# Altium footprint library Connector.PcbLib: 272 footprints (part 5 of 17)
Each footprint in its own frame and in the unit in brackets; x right, y up, seen from the top. Pads: shape width x height; smd on the part's side, far side on the other; paste and mask are expansions set on the pad; w line width, h text height; cw(c..) or ccw(c..) is an arc to the next point about the centre after c.
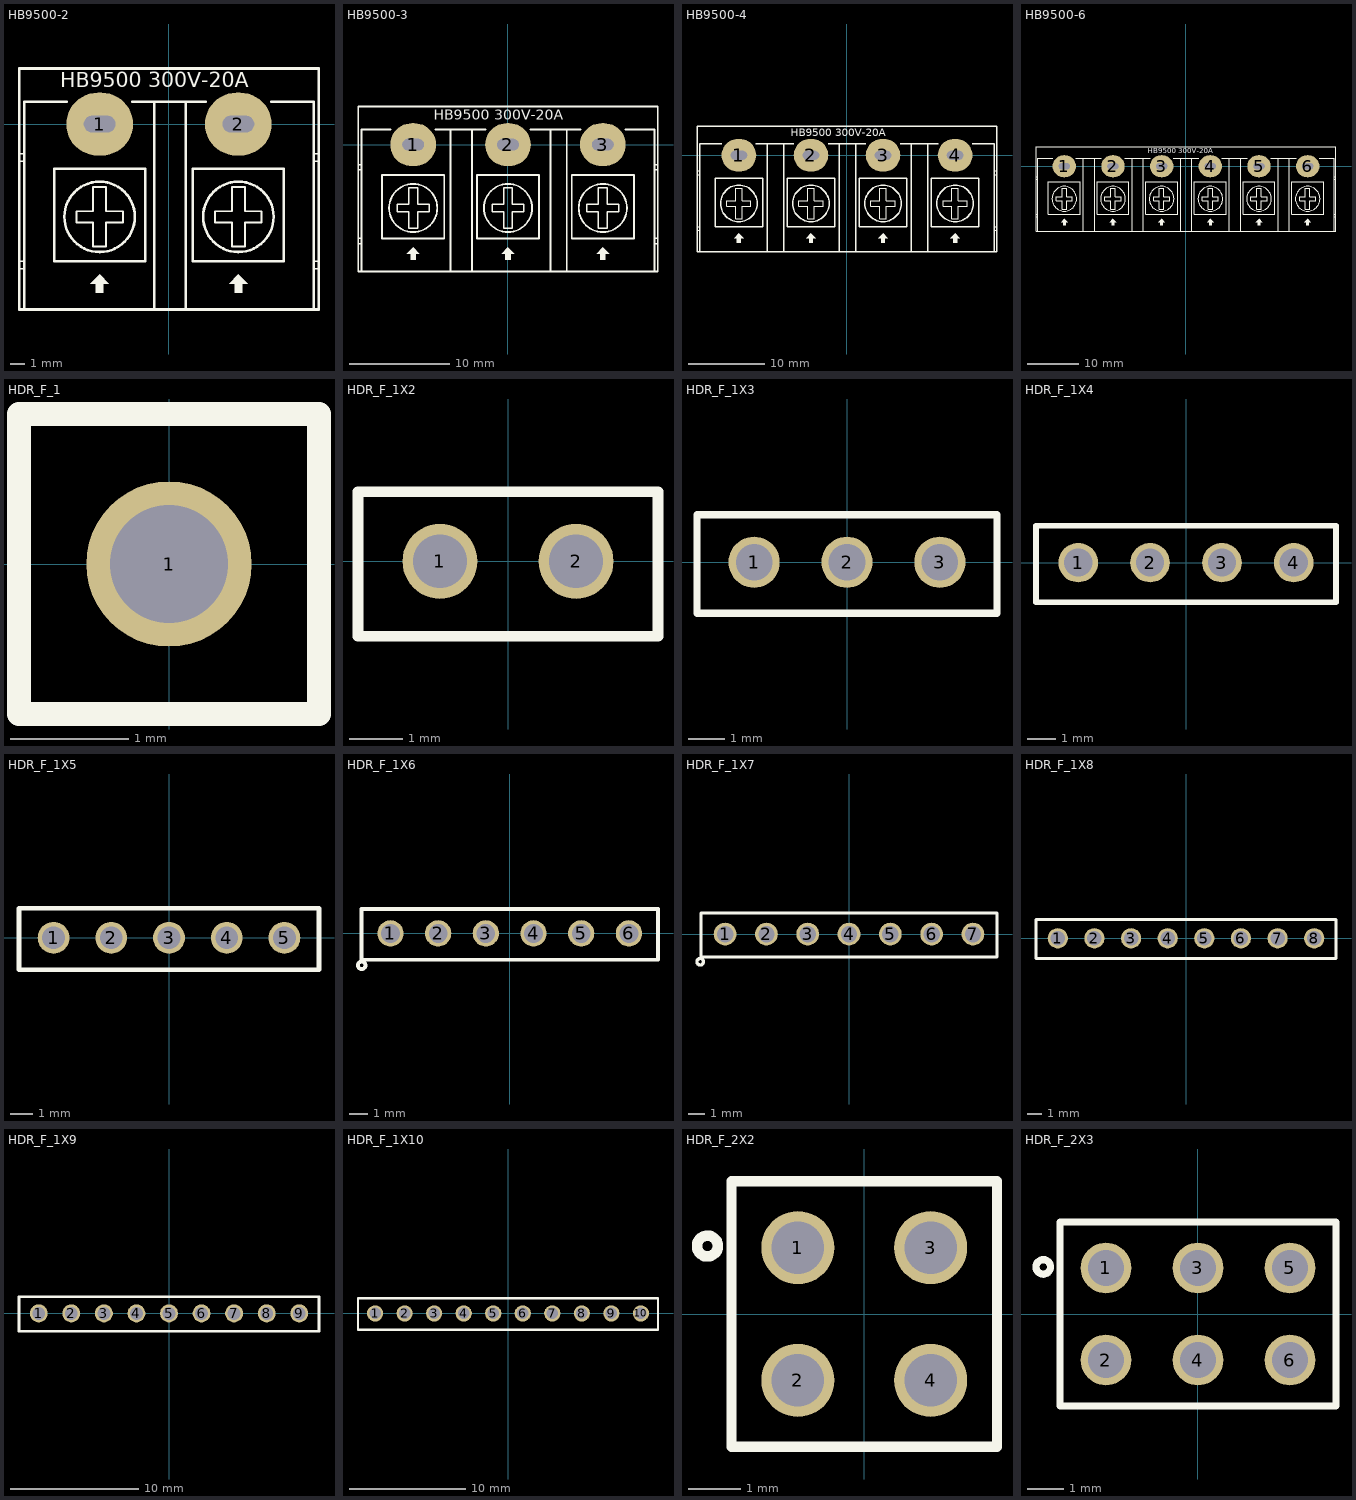
[diagram p4: the footprints below, top view; thin cyan lines are the x and y axes]

## HB9500-2 [mil]
pads (2):
  oval 180x170 hole 45 slot 85 at 0 deg: 1(-187.01,0) 2(187.01,0)
Top Overlay:
  circle w7: c-187.01,-250 r95
  circle w7: c187.01,-250 r95
  region: -187.01,-405 -212.01,-430 -197.01,-430 -197.01,-455 -177.01,-455 -177.01,-430 -162.01,-430
  region: 187.01,-405 162.01,-430 177.01,-430 177.01,-455 197.01,-455 197.01,-430 212.01,-430
  lines w5: -404.54,-390 -389.54,-390 ; -404.54,-370 -389.54,-370 ; -404.54,-100 -389.54,-100 ; -404.54,-80 -389.54,-80 ; 389.54,-390 404.54,-390 ; 389.54,-370 404.54,-370 ; 389.54,-100 404.54,-100 ; 389.54,-80 404.54,-80 ; -249.51,-265 -204.51,-265 -204.51,-330 -169.51,-330 -169.51,-265 -124.51,-265 -124.51,-235 -169.51,-235 -169.51,-170 -204.51,-170 -204.51,-235 -249.51,-235 -249.51,-265 ; 124.51,-265 169.51,-265 169.51,-330 204.51,-330 204.51,-265 249.51,-265 249.51,-235 204.51,-235 204.51,-170 169.51,-170 169.51,-235 124.51,-235 124.51,-265
  lines w7: -390.54,-495 -390.54,60 -275.59,60 ; -98.43,60 98.43,60 ; -40,-495 -40,60 ; 45,-495 45,60 ; 275.59,60 390.54,60 390.54,-495 ; -403.54,-500 403.54,-500 403.54,150 -403.54,150 -403.54,-500 ; -309.51,-370 -309.51,-120 -64.51,-120 -64.51,-370 -309.51,-370 ; 64.51,-370 64.51,-120 309.51,-120 309.51,-370 64.51,-370
  text "HB9500 300V-20A" at -293.24,99 h40
Top Designator:
  text ".Designator" at -146.08,-164.41 h60
3D body "HB9500_01x02_P9.50mm.step": height 720.47, standoff -303.15, extent -401.54,-428.15 405.55,201.77

## HB9500-3 [mil]
pads (3):
  oval 180x170 hole 45 slot 85 at 0 deg: 1(-374.02,0) 2(0,0) 3(374.02,0)
Top Overlay:
  circle w7: c374.02,-250 r95
  circle w7: c0,-250 r95
  circle w7: c-374.02,-250 r95
  region: 374.02,-405 349.02,-430 364.02,-430 364.02,-455 384.02,-455 384.02,-430 399.02,-430
  region: 0,-405 -25,-430 -10,-430 -10,-455 10,-455 10,-430 25,-430
  region: -374.02,-405 -399.02,-430 -384.02,-430 -384.02,-455 -364.02,-455 -364.02,-430 -349.02,-430
  lines w5: -591.55,-390 -576.55,-390 ; -591.55,-370 -576.55,-370 ; -591.55,-100 -576.55,-100 ; -591.55,-80 -576.55,-80 ; 576.55,-390 591.55,-390 ; 576.55,-370 591.55,-370 ; 576.55,-100 591.55,-100 ; 576.55,-80 591.55,-80 ; -436.52,-265 -436.52,-235 -391.52,-235 -391.52,-170 -356.52,-170 -356.52,-235 -311.52,-235 -311.52,-265 -356.52,-265 -356.52,-330 -391.52,-330 -391.52,-265 -436.52,-265 ; -62.5,-265 -62.5,-235 -17.5,-235 -17.5,-170 17.5,-170 17.5,-235 62.5,-235 62.5,-265 17.5,-265 17.5,-330 -17.5,-330 -17.5,-265 -62.5,-265 ; 311.52,-265 311.52,-235 356.52,-235 356.52,-170 391.52,-170 391.52,-235 436.52,-235 436.52,-265 391.52,-265 391.52,-330 356.52,-330 356.52,-265 311.52,-265
  lines w7: -577.55,-495 -577.55,60 -462.6,60 ; -285.43,60 -88.58,60 ; -227.01,-495 -227.01,60 ; -142.01,-495 -142.01,60 ; 88.58,60 285.43,60 ; 167.99,-495 167.99,60 ; 232.01,-495 232.01,60 ; 462.6,60 577.55,60 577.55,-495 ; -590.55,-500 590.55,-500 590.55,150 -590.55,150 -590.55,-500 ; -496.52,-370 -251.52,-370 -251.52,-120 -496.52,-120 -496.52,-370 ; -122.5,-370 122.5,-370 122.5,-120 -122.5,-120 -122.5,-370 ; 251.52,-370 496.52,-370 496.52,-120 251.52,-120 251.52,-370
  text "HB9500 300V-20A" at -293.24,99 h40
Top Designator:
  text ".Designator" at -146.08,-164.41 h60
3D body "HB9500_01x03_P9.50mm.step": height 720.47, standoff -303.15, extent -590.55,-428.15 590.55,201.77

## HB9500-4 [mil]
pads (4):
  oval 180x170 hole 45 slot 85 at 0 deg: 1(-561.02,0) 2(-187.01,0) 3(187.01,0) 4(561.02,0)
Top Overlay:
  circle w7: c-561.02,-250 r95
  circle w7: c-187.01,-250 r95
  circle w7: c187.01,-250 r95
  circle w7: c561.02,-250 r95
  region: -561.02,-405 -586.02,-430 -571.02,-430 -571.02,-455 -551.02,-455 -551.02,-430 -536.02,-430
  region: -187.01,-405 -212.01,-430 -197.01,-430 -197.01,-455 -177.01,-455 -177.01,-430 -162.01,-430
  region: 187.01,-405 162.01,-430 177.01,-430 177.01,-455 197.01,-455 197.01,-430 212.01,-430
  region: 561.02,-405 536.02,-430 551.02,-430 551.02,-455 571.02,-455 571.02,-430 586.02,-430
  lines w5: -778.56,-390 -763.56,-390 ; -778.56,-370 -763.56,-370 ; -778.56,-100 -763.56,-100 ; -778.56,-80 -763.56,-80 ; 763.56,-390 778.56,-390 ; 763.56,-370 778.56,-370 ; 763.56,-100 778.56,-100 ; 763.56,-80 778.56,-80 ; -623.52,-265 -578.52,-265 -578.52,-330 -543.52,-330 -543.52,-265 -498.52,-265 -498.52,-235 -543.52,-235 -543.52,-170 -578.52,-170 -578.52,-235 -623.52,-235 -623.52,-265 ; -249.51,-265 -204.51,-265 -204.51,-330 -169.51,-330 -169.51,-265 -124.51,-265 -124.51,-235 -169.51,-235 -169.51,-170 -204.51,-170 -204.51,-235 -249.51,-235 -249.51,-265 ; 124.51,-265 169.51,-265 169.51,-330 204.51,-330 204.51,-265 249.51,-265 249.51,-235 204.51,-235 204.51,-170 169.51,-170 169.51,-235 124.51,-235 124.51,-265 ; 498.52,-265 543.52,-265 543.52,-330 578.52,-330 578.52,-265 623.52,-265 623.52,-235 578.52,-235 578.52,-170 543.52,-170 543.52,-235 498.52,-235 498.52,-265
  lines w7: -764.56,-495 -764.56,60 -649.61,60 ; -472.44,60 -275.59,60 ; -414.02,-495 -414.02,60 ; -329.02,-495 -329.02,60 ; -98.43,60 98.43,60 ; -40,-495 -40,60 ; 45,-495 45,60 ; 275.59,60 472.44,60 ; 334.02,-495 334.02,60 ; 419.02,-495 419.02,60 ; 649.61,60 764.56,60 764.56,-495 ; -777.56,-500 -777.56,150 777.56,150 777.56,-500 -777.56,-500 ; -683.52,-370 -683.52,-120 -438.52,-120 -438.52,-370 -683.52,-370 ; -309.51,-370 -309.51,-120 -64.51,-120 -64.51,-370 -309.51,-370 ; 64.51,-370 64.51,-120 309.51,-120 309.51,-370 64.51,-370 ; 438.52,-370 438.52,-120 683.52,-120 683.52,-370 438.52,-370
  text "HB9500 300V-20A" at -293.24,99 h40
Top Designator:
  text ".Designator" at -146.08,-164.41 h60
3D body "HB9500_01x04_P9.50mm.step": height 720.47, standoff -303.15, extent -777.56,-428.15 777.56,201.77

## HB9500-6 [mil]
pads (6):
  oval 180x170 hole 45 slot 85 at 0 deg: 1(-935.04,0) 2(-561.02,0) 3(-187.01,0) 4(187.01,0) 5(561.02,0) 6(935.04,0)
Top Overlay:
  drawing of 139 lines, arcs and shapes, not listed
  text "HB9500 300V-20A" at -293.24,99 h40
Top Designator:
  text ".Designator" at -146.08,-164.41 h60
3D body "HB9500_01x06_P9.50mm.step": height 716.54, standoff -307.09, extent -1151.57,-428.15 1151.58,201.77

## HDR_F_1 [mm] "Connector; Header; 1 Position"
height 8
pads (1):
  round 1.4 / inner round 1.4 / far side oval 1.4x2.2 hole 1: 1(0,0)
Top Overlay:
  lines w0.2: -1.27,-1.27 -1.27,1.27 1.27,1.27 1.27,-1.27 -1.27,-1.27
Top Designator:
  text ".Designator" at -3.71,-0.344 h1.52
3D body "PBS-1.stp": height 8.5, standoff -3.15, extent -1.27,-1.27 1.27,1.27

## HDR_F_1X2 [mm] "HEADER FEMALE pitch: 2.54mm"
pads (2):
  round 1.4 / inner round 1.4 / far side oval 1.4x2.2 hole 1 mask+0.1: 1(-1.27,0) 2(1.27,0)
Top Overlay:
  lines w0.2: -2.8,-1.4 2.8,-1.4 2.8,1.3 -2.8,1.3 -2.8,-1.4
Top Designator:
  text ".Designator" at -3.71,-0.394 h1.52
3D body "female_header_a-bl254-eg-g02d.stp": height 8.5, standoff -3.2, extent -2.665,-1.3 2.665,1.2

## HDR_F_1X3 [mm] "HEADER FEMALE pitch: 2.54mm"
pads (3):
  round 1.4 / inner round 1.4 / far side oval 1.4x2.2 hole 1 mask+0.1: 1(-2.54,0) 2(0,0) 3(2.54,0)
Top Overlay:
  lines w0.2: -4.1,-1.4 -4.1,1.3 4.1,1.3 4.1,-1.4 -4.1,-1.4
Top Designator:
  text ".Designator" at -3.71,-0.394 h1.52
3D body "female_header_a-bl254-eg-g03d.stp": height 8.5, standoff -3.2, extent -3.935,-1.3 3.935,1.2

## HDR_F_1X4 [mm] "HEADER FEMALE pitch: 2.54mm"
pads (4):
  round 1.4 / inner round 1.4 / far side oval 1.4x2.2 hole 1 mask+0.1: 1(-3.81,0) 2(-1.27,0) 3(1.27,0) 4(3.81,0)
Top Overlay:
  lines w0.2: -5.3,-1.4 5.3,-1.4 5.3,1.3 -5.3,1.3 -5.3,-1.4
Top Designator:
  text ".Designator" at -3.71,-0.394 h1.52
3D body "female_header_a-bl254-eg-g04d.stp": height 8.5, standoff -3.2, extent -5.205,-1.25 5.205,1.25

## HDR_F_1X5 [mm] "HEADER FEMALE pitch: 2.54mm"
pads (5):
  round 1.4 / inner round 1.4 / far side oval 1.4x2.2 hole 1 mask+0.1: 1(-5.08,0) 2(-2.54,0) 3(0,0) 4(2.54,0) 5(5.08,0)
Top Overlay:
  lines w0.2: -6.6,-1.4 -6.6,1.3 6.6,1.3 6.6,-1.4 -6.6,-1.4
Top Designator:
  text ".Designator" at -3.71,-0.394 h1.52
3D body "female_header_a-bl254-eg-g05d.stp": height 8.5, standoff -3.2, extent -6.475,-1.25 6.475,1.25

## HDR_F_1X6 [mm] "HEADER FEMALE pitch: 2.54mm"
pads (6):
  round 1.4 / inner round 1.4 / far side oval 1.4x2.2 hole 1 mask+0.1: 1(-6.35,0) 2(-3.81,0) 3(-1.27,0) 4(1.27,0) 5(3.81,0) 6(6.35,0)
Top Overlay:
  circle w0.2: c-7.88,-1.7 r0.2
  lines w0.2: -7.9,-1.4 7.9,-1.4 7.9,1.3 -7.9,1.3 -7.9,-1.4
Top Designator:
  text ".Designator" at -3.8,-0.644 h1.52
3D body "female_header_a-bl254-eg-g06d.stp": height 8.5, standoff -3.2, extent -7.747,-1.25 7.743,1.25

## HDR_F_1X7 [mm] "HEADER FEMALE pitch: 2.54mm"
pads (7):
  round 1.4 / inner round 1.4 / far side oval 1.4x2.2 hole 1 mask+0.1: 1(-7.62,0) 2(-5.08,0) 3(-2.54,0) 4(0,0) 5(2.54,0) 6(5.08,0) 7(7.62,0)
Top Overlay:
  circle w0.2: c-9.15,-1.7 r0.2
  lines w0.2: -9.1,-1.4 9.1,-1.4 9.1,1.3 -9.1,1.3 -9.1,-1.4
Top Designator:
  text ".Designator" at -3.835,-0.644 h1.52
3D body "female_header_a-bl254-eg-g07d.stp": height 8.5, standoff -3.2, extent -9.015,-1.25 9.015,1.25

## HDR_F_1X8 [mm] "HEADER FEMALE pitch: 2.54mm"
pads (8):
  round 1.4 / inner round 1.4 / far side oval 1.4x2.2 hole 1 mask+0.1: 1(-8.89,0) 2(-6.35,0) 3(-3.81,0) 4(-1.27,0) 5(1.27,0) 6(3.81,0) 7(6.35,0) 8(8.89,0)
Top Overlay:
  lines w0.2: -10.4,-1.4 -10.4,1.3 10.4,1.3 10.4,-1.4 -10.4,-1.4
Top Designator:
  text ".Designator" at -3.71,-0.394 h1.52
3D body "female_header_a-bl254-eg-g08d.stp": height 8.5, standoff -3.2, extent -10.287,-1.25 10.283,1.25

## HDR_F_1X9 [mm] "HEADER FEMALE pitch: 2.54mm"
pads (9):
  round 1.4 / inner round 1.4 / far side oval 1.4x2.2 hole 1 mask+0.1: 1(-10.16,0) 2(-7.62,0) 3(-5.08,0) 4(-2.54,0) 5(0,0) 6(2.54,0) 7(5.08,0) 8(7.62,0) 9(10.16,0)
Top Overlay:
  lines w0.2: -11.7,-1.4 11.7,-1.4 11.7,1.3 -11.7,1.3 -11.7,-1.4
Top Designator:
  text ".Designator" at -3.71,-0.394 h1.52
3D body "female_header_a-bl254-eg-g09d.stp": height 8.5, standoff -3.2, extent -11.555,-1.25 11.555,1.25

## HDR_F_1X10 [mm] "HEADER FEMALE pitch: 2.54mm"
pads (10):
  round 1.4 / inner round 1.4 / far side oval 1.4x2.2 hole 1 mask+0.1: 1(-11.43,0) 2(-8.89,0) 3(-6.35,0) 4(-3.81,0) 5(-1.27,0) 6(1.27,0) 7(3.81,0) 8(6.35,0) 9(8.89,0) 10(11.43,0)
Top Overlay:
  lines w0.2: -12.9,-1.4 12.9,-1.4 12.9,1.3 -12.9,1.3 -12.9,-1.4
Top Designator:
  text ".Designator" at -3.71,-0.394 h1.52
3D body "female_header_a-bl254-eg-g10d.stp": height 8.5, standoff -3.2, extent -12.825,-1.25 12.825,1.25

## HDR_F_2X2 [mm] "Connector; Header; 2x2 Position"
height 8
pads (4):
  round 1.4 / inner round 1.4 / far side oval 1.4x2.2 hole 1: 1(-1.27,1.27) 2(-1.27,-1.27) 3(1.27,1.27) 4(1.27,-1.27)
Top Overlay:
  circle w0.2: c-3,1.3 r0.2
  lines w0.2: -2.54,-2.54 2.54,-2.54 2.54,2.54 -2.54,2.54 -2.54,-2.54
Top Designator:
  text ".Designator" at -4.04,-0.344 h1.52
3D body "PBD-2.stp": height 8.5, standoff -3.15, extent -2.54,-2.54 0,2.54
3D body "PBD-2.stp": height 8.5, standoff -3.15, extent 0,-2.54 2.54,2.54

## HDR_F_2X3 [mm] "Connector; Header; 3x2 Position"
height 8
pads (6):
  round 1.4 / inner round 1.4 / far side oval 1.4x2.2 hole 1: 1(-2.54,1.27) 2(-2.54,-1.27) 3(0,1.27) 4(0,-1.27) 5(2.54,1.27) 6(2.54,-1.27)
Top Overlay:
  circle w0.2: c-4.27,1.3 r0.2
  lines w0.2: -3.81,-2.54 -3.81,2.54 3.81,2.54 3.81,-2.54 -3.81,-2.54
Top Designator:
  text ".Designator" at -4.04,-0.344 h1.52
3D body "PBD-2.stp": height 8.5, standoff -3.15, extent 1.27,-2.54 3.81,2.54
3D body "PBD-2.stp": height 8.5, standoff -3.15, extent -3.81,-2.54 -1.27,2.54
3D body "PBD-2.stp": height 8.5, standoff -3.15, extent -1.27,-2.54 1.27,2.54